# Altium footprint library AP63203WU-7.PcbLib: 1 footprints
Each footprint in its own frame and in the unit in brackets; x right, y up, seen from the top. Pads: shape width x height; smd on the part's side, far side on the other; paste and mask are expansions set on the pad; w line width, h text height; cw(c..) or ccw(c..) is an arc to the next point about the centre after c.
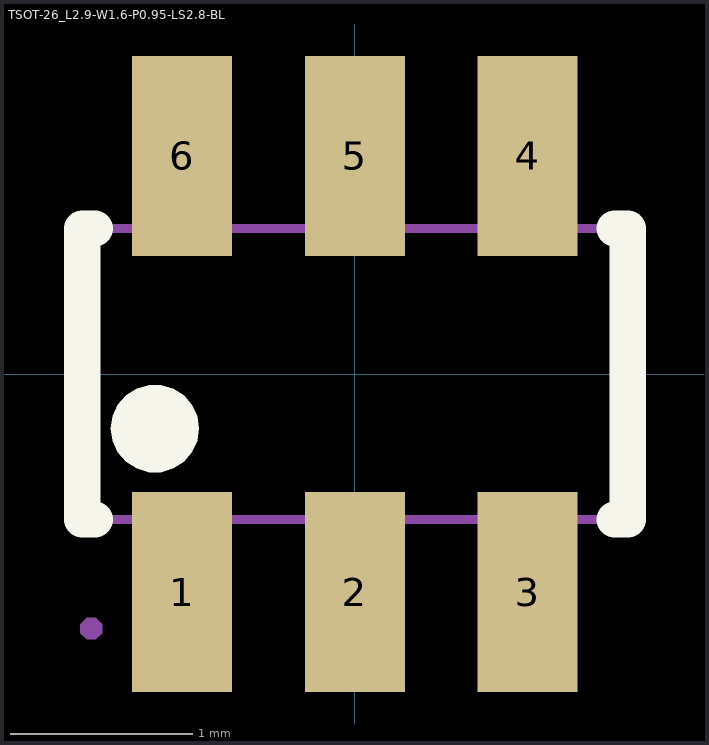
[diagram p0: the footprint, top view; thin cyan lines are the x and y axes]

## TSOT-26_L2.9-W1.6-P0.95-LS2.8-BL [mm]
pads (6):
  rect 0.55x1.1 smd paste+0 mask+0.05: 1(-0.95,-1.2) 2(0,-1.2) 3(0.95,-1.2) 4(0.95,1.2) 5(0,1.2) 6(-0.95,1.2)
Top Overlay:
  region: -1.341,-0.3 -1.332,-0.232 -1.303,-0.169 -1.258,-0.118 -1.2,-0.08 -1.134,-0.061 -1.066,-0.061 -1,-0.08 -0.942,-0.118 -0.897,-0.169 -0.868,-0.232 -0.859,-0.3 -0.868,-0.368 -0.897,-0.431 -0.942,-0.482 -1,-0.52 -1.066,-0.539 -1.134,-0.539 -1.2,-0.52 -1.258,-0.482 -1.303,-0.431 -1.332,-0.368
  lines w0.2: -1.429,-0.8 -1.5,-0.8 -1.5,-0.572 -1.5,0.572 -1.5,0.8 -1.429,0.8 ; 1.429,-0.8 1.5,-0.8 1.5,-0.572 1.5,0.572 1.5,0.8 1.429,0.8
Mechanical 2:
  circle w0.2: c-1,-1.4 r0.1
Mechanical 6:
  lines w0.051: -1.45,-0.8 1.45,-0.8 1.45,0.8 -1.45,0.8 -1.45,-0.8
Mechanical 7:
  region: -1.17,0.79 -1.17,1.01 -0.73,1.01 -0.73,0.79
  region: -0.22,0.79 -0.22,1.01 0.22,1.01 0.22,0.79
  region: 0.73,0.79 0.73,1.01 1.17,1.01 1.17,0.79
  region: 0.73,-1.01 0.73,-0.79 1.17,-0.79 1.17,-1.01
  region: -0.22,-1.01 -0.22,-0.79 0.22,-0.79 0.22,-1.01
  region: -1.17,-1.01 -1.17,-0.79 -0.73,-0.79 -0.73,-1.01
Mechanical 8:
  region: -1.39,-1.4 -1.39,-1.425 -1.425,-1.46 -1.475,-1.46 -1.51,-1.425 -1.51,-1.4 -1.51,-1.375 -1.475,-1.34 -1.425,-1.34 -1.39,-1.375 -1.39,-1.4
Mechanical 9:
  region: -1.17,1 -1.17,1.4 -0.73,1.4 -0.73,1
  region: -0.22,1 -0.22,1.4 0.22,1.4 0.22,1
  region: 0.73,1 0.73,1.4 1.17,1.4 1.17,1
  region: 0.73,-1.4 0.73,-1 1.17,-1 1.17,-1.4
  region: -0.22,-1.4 -0.22,-1 0.22,-1 0.22,-1.4
  region: -1.17,-1.4 -1.17,-1 -0.73,-1 -0.73,-1.4